# Altium footprint library ICs_VendorSpecific.PcbLib: 247 footprints (part 9 of 19)
Each footprint in its own frame and in the unit in brackets; x right, y up, seen from the top. Pads: shape width x height; smd on the part's side, far side on the other; paste and mask are expansions set on the pad; w line width, h text height; cw(c..) or ccw(c..) is an arc to the next point about the centre after c.
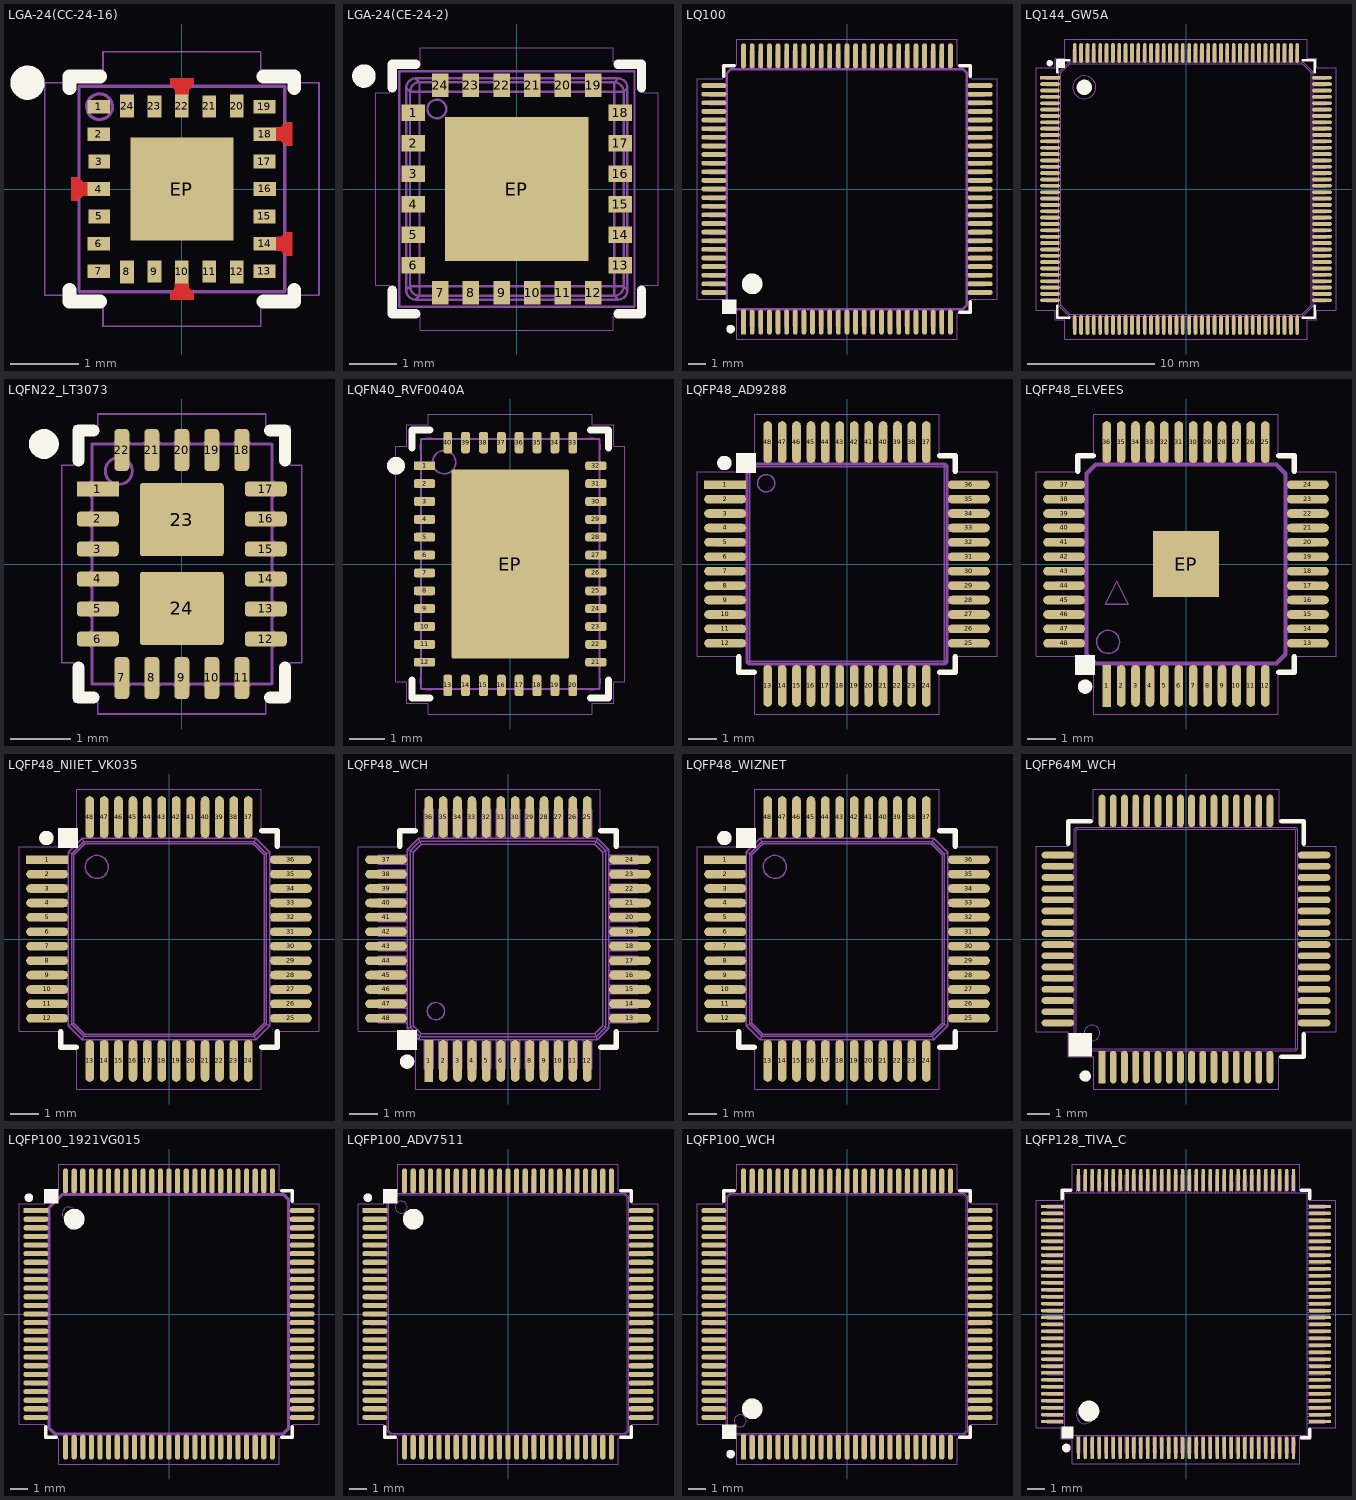
[diagram p8: the footprints below, top view; thin cyan lines are the x and y axes]

## LGA-24(CC-24-16) [mm] "LGA, 24-Leads, Body 3x3mm, Pitch 0.40mm, Thermal Pad 1.50x1.50mm"
height 0.696
pads (25):
  rect 0.33x0.2 smd mask+0.05: 1(-1.21,1.2) 2(-1.21,0.8) 4(-1.21,0) 6(-1.21,-0.8) 7(-1.21,-1.2) 14(1.21,-0.8) 16(1.21,0) 18(1.21,0.8)
  rect 0.32x0.2 smd mask+0.05: 3(-1.205,0.4) 5(-1.205,-0.4) 13(1.205,-1.2) 15(1.205,-0.4) 17(1.205,0.4) 19(1.205,1.2)
  rect 0.2x0.33 smd mask+0.05: 8(-0.8,-1.21) 10(0,-1.21) 12(0.8,-1.21) 20(0.8,1.21) 22(0,1.21) 24(-0.8,1.21)
  rect 0.2x0.32 smd mask+0.05: 9(-0.4,-1.205) 11(0.4,-1.205) 21(0.4,1.205) 23(-0.4,1.205)
  rect 1.5x1.5 smd paste-4 mask+0.1: EP(0,0)
Top Layer:
  region: -1.519,0.17 -1.439,0.1 -1.37,0.1 -1.37,-0.1 -1.439,-0.1 -1.519,-0.17 -1.613,-0.17 -1.613,0.17
  region: 0.17,1.519 0.1,1.439 0.1,1.37 -0.1,1.37 -0.1,1.439 -0.17,1.519 -0.17,1.613 0.17,1.613
  region: 1.519,0.63 1.439,0.7 1.37,0.7 1.37,0.9 1.439,0.9 1.519,0.97 1.613,0.97 1.613,0.63
  region: 1.519,-0.97 1.439,-0.9 1.37,-0.9 1.37,-0.7 1.439,-0.7 1.519,-0.63 1.613,-0.63 1.613,-0.97
  region: -0.17,-1.519 -0.1,-1.439 -0.1,-1.37 0.1,-1.37 0.1,-1.439 0.17,-1.519 0.17,-1.613 -0.17,-1.613
Top Overlay:
  circle w0.25: c-2.25,1.55 r0.125
  lines w0.2: -1.64,-1.474 -1.64,-1.64 -1.19,-1.64 ; -1.64,1.474 -1.64,1.64 -1.19,1.64 ; 1.19,-1.64 1.64,-1.64 1.64,-1.474 ; 1.19,1.64 1.64,1.64 1.64,1.474
Top Paste:
  rectangle: -0.7,0.1 -0.1,0.7
  rectangle: 0.1,0.1 0.7,0.7
  rectangle: -0.7,-0.7 -0.1,-0.1
  rectangle: 0.1,-0.7 0.7,-0.1
  region: -0.7,1.375 -0.9,1.375 -0.9,1.475 -0.7,1.475
  region: -0.3,1.365 -0.5,1.365 -0.5,1.465 -0.3,1.465
  region: 0.1,1.375 -0.1,1.375 -0.1,1.475 0.1,1.475
  region: 0.5,1.365 0.3,1.365 0.3,1.465 0.5,1.465
  region: 0.9,1.375 0.7,1.375 0.7,1.475 0.9,1.475
  region: 1.365,1.1 1.365,1.3 1.465,1.3 1.465,1.1
  region: 1.375,0.7 1.375,0.9 1.475,0.9 1.475,0.7
  region: 1.365,0.3 1.365,0.5 1.465,0.5 1.465,0.3
  region: 1.375,-0.1 1.375,0.1 1.475,0.1 1.475,-0.1
  region: 1.365,-0.5 1.365,-0.3 1.465,-0.3 1.465,-0.5
  region: 1.375,-0.9 1.375,-0.7 1.475,-0.7 1.475,-0.9
  region: 1.365,-1.3 1.365,-1.1 1.465,-1.1 1.465,-1.3
  region: 0.7,-1.375 0.9,-1.375 0.9,-1.475 0.7,-1.475
  region: 0.3,-1.365 0.5,-1.365 0.5,-1.465 0.3,-1.465
  region: -0.1,-1.375 0.1,-1.375 0.1,-1.475 -0.1,-1.475
  region: -0.5,-1.365 -0.3,-1.365 -0.3,-1.465 -0.5,-1.465
  region: -0.9,-1.375 -0.7,-1.375 -0.7,-1.475 -0.9,-1.475
  region: -1.375,-1.1 -1.375,-1.3 -1.475,-1.3 -1.475,-1.1
  region: -1.375,-0.7 -1.375,-0.9 -1.475,-0.9 -1.475,-0.7
  region: -1.365,-0.3 -1.365,-0.5 -1.465,-0.5 -1.465,-0.3
  region: -1.37,0.1 -1.37,-0.1 -1.47,-0.1 -1.47,0.1
  region: -1.365,0.5 -1.365,0.3 -1.465,0.3 -1.465,0.5
  region: -1.375,1.3 -1.375,1.1 -1.475,1.1 -1.475,1.3
  region: -1.375,0.9 -1.375,0.7 -1.475,0.7 -1.475,0.9
Top Solder:
  region: 1.415,-1.05 1.65,-1.05 1.65,-1.35 1.415,-1.35
  region: 1.415,1.35 1.65,1.35 1.65,1.05 1.415,1.05
  region: 0.65,1.415 0.65,1.65 0.95,1.65 0.95,1.415
  region: -0.95,1.415 -0.95,1.65 -0.65,1.65 -0.65,1.415
  region: 0.25,1.41 0.25,1.65 0.55,1.65 0.55,1.41
  region: -0.55,1.41 -0.55,1.65 -0.25,1.65 -0.25,1.41
  region: -0.15,1.424 -0.15,1.65 0.15,1.65 0.15,1.424
  region: 1.415,-0.65 1.65,-0.65 1.65,-0.95 1.415,-0.95
  region: 1.415,0.95 1.65,0.95 1.65,0.65 1.415,0.65
  region: 1.41,-0.25 1.65,-0.25 1.65,-0.55 1.41,-0.55
  region: 1.41,0.55 1.65,0.55 1.65,0.25 1.41,0.25
  region: 1.424,0.15 1.65,0.15 1.65,-0.15 1.424,-0.15
  region: -1.415,0.95 -1.65,0.95 -1.65,0.65 -1.415,0.65
  region: -1.41,-0.25 -1.65,-0.25 -1.65,-0.55 -1.41,-0.55
  region: -1.41,0.55 -1.65,0.55 -1.65,0.25 -1.41,0.25
  region: -1.424,0.15 -1.65,0.15 -1.65,-0.15 -1.424,-0.15
  region: 0.65,-1.415 0.65,-1.65 0.95,-1.65 0.95,-1.415
  region: 0.25,-1.41 0.25,-1.65 0.55,-1.65 0.55,-1.41
  region: -0.15,-1.424 -0.15,-1.65 0.15,-1.65 0.15,-1.424
  region: -1.415,1.35 -1.65,1.35 -1.65,1.05 -1.415,1.05
  region: -1.415,-0.65 -1.65,-0.65 -1.65,-0.95 -1.415,-0.95
  region: -1.415,-1.05 -1.65,-1.05 -1.65,-1.35 -1.415,-1.35
  region: -0.95,-1.415 -0.95,-1.65 -0.65,-1.65 -0.65,-1.415
  region: -0.55,-1.41 -0.55,-1.65 -0.25,-1.65 -0.25,-1.41
Top Courtyard:
  lines w0.025: -2,-1.55 -1.7,-1.55 -1.7,-1.7 -1.15,-1.7 -1.15,-2 1.15,-2 1.15,-1.7 1.7,-1.7 1.7,-1.55 2,-1.55 2,1.55 1.7,1.55 1.7,1.7 1.15,1.7 1.15,2 -1.15,2 -1.15,1.7 -1.7,1.7 -1.7,1.55 -2,1.55 -2,-1.55
Top Assembly:
  lines w0.05: -1.014,1.221 ccw(c-1.2,1.2) -1.013,1.19 ; -1.5,-1.5 -1.5,1.5 1.5,1.5 1.5,-1.5 -1.5,-1.5
  text ".Designator" at -4.511,-0.453 h2
3D body "CC-24-16(LGA24).x_t": height 0.7, standoff -0.01, extent -1.5,-1.5 1.5,1.5

## LGA-24(CE-24-2) [mm] "24-Terminal Chip Array Small Outline No Lead [LGA_CAV]  5.00 mm x 5.00 mm Body and 1.60 mm Height"
height 1.6
pads (25):
  rect 0.5x0.35 smd mask+0.05: 1(-2.2,1.625) 2(-2.2,0.975) 3(-2.2,0.325) 4(-2.2,-0.325) 5(-2.2,-0.975) 6(-2.2,-1.625) 13(2.2,-1.625) 14(2.2,-0.975) 15(2.2,-0.325) 16(2.2,0.325) 17(2.2,0.975) 18(2.2,1.625)
  rect 0.35x0.5 smd mask+0.05: 7(-1.625,-2.2) 8(-0.975,-2.2) 9(-0.325,-2.2) 10(0.325,-2.2) 11(0.975,-2.2) 12(1.625,-2.2) 19(1.625,2.2) 20(0.975,2.2) 21(0.325,2.2) 22(-0.325,2.2) 23(-0.975,2.2) 24(-1.625,2.2)
  rect 3.05x3.05 smd paste-5 mask+0.01: EP(0,0)
Top Overlay:
  circle w0.25: c-3.25,2.4 r0.125
  lines w0.2: -2.65,-2.15 -2.65,-2.65 -2.15,-2.65 ; -2.65,2.15 -2.65,2.65 -2.15,2.65 ; 2.15,-2.65 2.65,-2.65 2.65,-2.15 ; 2.15,2.65 2.65,2.65 2.65,2.15
Top Paste:
  rectangle: 0.1,0.9 0.7,1.5
  rectangle: -0.7,0.9 -0.1,1.5
  rectangle: 0.1,-0.7 0.7,-0.1
  rectangle: -0.7,-0.7 -0.1,-0.1
  rectangle: 0.1,0.1 0.7,0.7
  rectangle: -0.7,0.1 -0.1,0.7
  region: -0.9,1.5 -1.5,1.5 -1.5,0.9 -0.9,0.9
  region: -0.9,-0.1 -1.5,-0.1 -1.5,-0.7 -0.9,-0.7
  region: -0.9,0.7 -1.5,0.7 -1.5,0.1 -0.9,0.1
  rectangle: 0.9,0.9 1.5,1.5
  rectangle: 0.9,-0.7 1.5,-0.1
  rectangle: 0.9,0.1 1.5,0.7
  rectangle: 0.1,-1.5 0.7,-0.9
  rectangle: -0.7,-1.5 -0.1,-0.9
  region: -0.9,-0.9 -1.5,-0.9 -1.5,-1.5 -0.9,-1.5
  rectangle: 0.9,-1.5 1.5,-0.9
Top Solder:
  region: -2.45,-1.4 -2.8,-1.4 -2.8,-1.85 -2.45,-1.85
  region: -2.45,-0.75 -2.8,-0.75 -2.8,-1.2 -2.45,-1.2
  region: -2.45,-0.1 -2.8,-0.1 -2.8,-0.55 -2.45,-0.55
  region: -2.45,0.55 -2.8,0.55 -2.8,0.1 -2.45,0.1
  region: -2.45,1.2 -2.8,1.2 -2.8,0.75 -2.45,0.75
  region: -2.45,1.85 -2.8,1.85 -2.8,1.4 -2.45,1.4
  region: -1.4,2.45 -1.4,2.8 -1.85,2.8 -1.85,2.45
  region: -0.75,2.45 -0.75,2.8 -1.2,2.8 -1.2,2.45
  region: -0.1,2.45 -0.1,2.8 -0.55,2.8 -0.55,2.45
  region: 0.55,2.45 0.55,2.8 0.1,2.8 0.1,2.45
  region: 1.2,2.45 1.2,2.8 0.75,2.8 0.75,2.45
  region: 1.85,2.45 1.85,2.8 1.4,2.8 1.4,2.45
  region: 2.45,1.4 2.8,1.4 2.8,1.85 2.45,1.85
  region: 2.45,0.75 2.8,0.75 2.8,1.2 2.45,1.2
  region: 2.45,0.1 2.8,0.1 2.8,0.55 2.45,0.55
  region: 2.45,-0.55 2.8,-0.55 2.8,-0.1 2.45,-0.1
  region: 2.45,-1.2 2.8,-1.2 2.8,-0.75 2.45,-0.75
  region: 2.45,-1.85 2.8,-1.85 2.8,-1.4 2.45,-1.4
  region: 1.4,-2.45 1.4,-2.8 1.85,-2.8 1.85,-2.45
  region: 0.75,-2.45 0.75,-2.8 1.2,-2.8 1.2,-2.45
  region: 0.1,-2.45 0.1,-2.8 0.55,-2.8 0.55,-2.45
  region: -0.55,-2.45 -0.55,-2.8 -0.1,-2.8 -0.1,-2.45
  region: -1.2,-2.45 -1.2,-2.8 -0.75,-2.8 -0.75,-2.45
  region: -1.85,-2.45 -1.85,-2.8 -1.4,-2.8 -1.4,-2.45
Top Courtyard:
  lines w0.025: -3,-2.05 -2.7,-2.05 -2.7,-2.7 -2.05,-2.7 -2.05,-3 2.05,-3 2.05,-2.7 2.7,-2.7 2.7,-2.05 3,-2.05 3,2.05 2.7,2.05 2.7,2.7 2.05,2.7 2.05,3 -2.05,3 -2.05,2.7 -2.7,2.7 -2.7,2.05 -3,2.05 -3,-2.05
Top Assembly:
  circle w0.05: c-1.7,1.7 r0.2
  lines w0.05: -2.35,-2.15 ccw(c-2.151,-2.151) -2.15,-2.35 ; -2.35,-2.15 -2.35,2.15 ; -2.35,-2.15 -2.269,-2.069 ; -2.35,2.15 cw(c-2.151,2.151) -2.15,2.35 ; -2.35,2.15 -2.269,2.069 ; -2.269,-2.069 ccw(c-2.068,-2.068) -2.069,-2.269 ; -2.269,-2.069 -2.269,2.069 ; -2.269,-2.069 2.269,-2.069 ; -2.269,2.069 cw(c-2.068,2.068) -2.069,2.269 ; -2.269,2.069 2.269,2.069 ; -2.15,-2.35 2.15,-2.35 ; -2.15,-2.35 -2.069,-2.269 ; -2.15,2.35 2.15,2.35 ; -2.15,2.35 -2.069,2.269 ; -2.069,-2.269 2.069,-2.269 ; -2.069,-2.269 -2.069,2.269 ; -2.069,2.269 2.069,2.269 ; 2.069,-2.269 ccw(c2.068,-2.068) 2.269,-2.069 ; 2.069,-2.269 2.15,-2.35 ; 2.069,-2.269 2.069,2.269 ; 2.069,2.269 cw(c2.068,2.068) 2.269,2.069 ; 2.069,2.269 2.15,2.35 ; 2.15,-2.35 ccw(c2.151,-2.151) 2.35,-2.15 ; 2.15,2.35 cw(c2.151,2.151) 2.35,2.15 ; 2.269,-2.069 2.35,-2.15 ; 2.269,-2.069 2.269,2.069 ; 2.269,2.069 2.35,2.15 ; 2.35,-2.15 2.35,2.15 ; -2.5,-2.5 -2.5,2.5 2.5,2.5 2.5,-2.5 -2.5,-2.5
  text ".Designator" at -4.511,-0.453 h2
3D body "CE-24-2.x_t": height 1.6, standoff -0.01, extent -2.5,-2.5 2.5,2.5

## LQ100 [mm] "LQFP, 100-Leads, Body 14.00x14.00mm, Pitch 0.50mm, IPC Medium Density"
height 1.6
pads (100):
  rect 0.275x1.45 smd paste+0 mask+0.05: 1(-6,-7.725)
  oval 0.275x1.45 smd paste+0 mask+0.05: 2(-5.5,-7.725) 3(-5,-7.725) 4(-4.5,-7.725) 5(-4,-7.725) 6(-3.5,-7.725) 7(-3,-7.725) 8(-2.5,-7.725) 9(-2,-7.725) 10(-1.5,-7.725) 11(-1,-7.725) 12(-0.5,-7.725) 13(0,-7.725) 14(0.5,-7.725) 15(1,-7.725) 16(1.5,-7.725) 17(2,-7.725) 18(2.5,-7.725) 19(3,-7.725) 20(3.5,-7.725) 21(4,-7.725) 22(4.5,-7.725) 23(5,-7.725) 24(5.5,-7.725) 25(6,-7.725) 51(6,7.725) 52(5.5,7.725) 53(5,7.725) 54(4.5,7.725) 55(4,7.725) 56(3.5,7.725) 57(3,7.725) 58(2.5,7.725) 59(2,7.725) 60(1.5,7.725) 61(1,7.725) 62(0.5,7.725) 63(0,7.725) 64(-0.5,7.725) 65(-1,7.725) 66(-1.5,7.725) 67(-2,7.725) 68(-2.5,7.725) 69(-3,7.725) 70(-3.5,7.725) 71(-4,7.725) 72(-4.5,7.725) 73(-5,7.725) 74(-5.5,7.725) 75(-6,7.725)
  oval 1.45x0.275 smd paste+0 mask+0.05: 26(7.725,-6) 27(7.725,-5.5) 28(7.725,-5) 29(7.725,-4.5) 30(7.725,-4) 31(7.725,-3.5) 32(7.725,-3) 33(7.725,-2.5) 34(7.725,-2) 35(7.725,-1.5) 36(7.725,-1) 37(7.725,-0.5) 38(7.725,0) 39(7.725,0.5) 40(7.725,1) 41(7.725,1.5) 42(7.725,2) 43(7.725,2.5) 44(7.725,3) 45(7.725,3.5) 46(7.725,4) 47(7.725,4.5) 48(7.725,5) 49(7.725,5.5) 50(7.725,6) 76(-7.725,6) 77(-7.725,5.5) 78(-7.725,5) 79(-7.725,4.5) 80(-7.725,4) 81(-7.725,3.5) 82(-7.725,3) 83(-7.725,2.5) 84(-7.725,2) 85(-7.725,1.5) 86(-7.725,1) 87(-7.725,0.5) 88(-7.725,0) 89(-7.725,-0.5) 90(-7.725,-1) 91(-7.725,-1.5) 92(-7.725,-2) 93(-7.725,-2.5) 94(-7.725,-3) 95(-7.725,-3.5) 96(-7.725,-4) 97(-7.725,-4.5) 98(-7.725,-5) 99(-7.725,-5.5) 100(-7.725,-6)
Top Overlay:
  circle w0.6: c-5.5,-5.5 r0.3
  circle w0.25: c-6.75,-8.125 r0.125
  region: -6.4,-7.25 -6.4,-6.4 -7.25,-6.4 -7.25,-7.25
  lines w0.2: -7.15,6.525 -7.15,7.15 -6.55,7.15 ; 6.525,7.15 7.15,7.15 7.15,6.55 ; 6.55,-7.15 7.15,-7.15 7.15,-6.525
Top Courtyard:
  lines w0.025: -8.7,-6.4 -8.7,6.4 -7.2,6.4 -7.2,7.2 -6.4,7.2 -6.4,8.7 6.4,8.7 6.4,7.2 7.2,7.2 7.2,6.4 8.7,6.4 8.7,-6.4 7.2,-6.4 7.2,-7.2 6.4,-7.2 6.4,-8.7 -6.4,-8.7 -6.4,-7.2 -7.2,-7.2 -7.2,-6.4 -8.7,-6.4
Top Assembly:
  drawing of 1741 lines, arcs and shapes, not listed
  text ".Designator" at -4.511,-0.453 h2
3D body "LQ100_LQ100X.x_t": height 1.45, standoff 0, extent -8,-8 8,8

## LQ144_GW5A [mm] "LQFP-144, 144-Leads, Body 20.00x20.00mm, Pitch 0.50mm"
height 1.4
pads (144):
  rect 1.55x0.3 smd paste+0 mask+0.05: 1(-10.7,8.75)
  oval 1.55x0.3 smd paste+0 mask+0.05: 2(-10.7,8.25) 3(-10.7,7.75) 4(-10.7,7.25) 5(-10.7,6.75) 6(-10.7,6.25) 7(-10.7,5.75) 8(-10.7,5.25) 9(-10.7,4.75) 10(-10.7,4.25) 11(-10.7,3.75) 12(-10.7,3.25) 13(-10.7,2.75) 14(-10.7,2.25) 15(-10.7,1.75) 16(-10.7,1.25) 17(-10.7,0.75) 18(-10.7,0.25) 19(-10.7,-0.25) 20(-10.7,-0.75) 21(-10.7,-1.25) 22(-10.7,-1.75) 23(-10.7,-2.25) 24(-10.7,-2.75) 25(-10.7,-3.25) 26(-10.7,-3.75) 27(-10.7,-4.25) 28(-10.7,-4.75) 29(-10.7,-5.25) 30(-10.7,-5.75) 31(-10.7,-6.25) 32(-10.7,-6.75) 33(-10.7,-7.25) 34(-10.7,-7.75) 35(-10.7,-8.25) 36(-10.7,-8.75) 73(10.7,-8.75) 74(10.7,-8.25) 75(10.7,-7.75) 76(10.7,-7.25) 77(10.7,-6.75) 78(10.7,-6.25) 79(10.7,-5.75) 80(10.7,-5.25) 81(10.7,-4.75) 82(10.7,-4.25) 83(10.7,-3.75) 84(10.7,-3.25) 85(10.7,-2.75) 86(10.7,-2.25) 87(10.7,-1.75) 88(10.7,-1.25) 89(10.7,-0.75) 90(10.7,-0.25) 91(10.7,0.25) 92(10.7,0.75) 93(10.7,1.25) 94(10.7,1.75) 95(10.7,2.25) 96(10.7,2.75) 97(10.7,3.25) 98(10.7,3.75) 99(10.7,4.25) 100(10.7,4.75) 101(10.7,5.25) 102(10.7,5.75) 103(10.7,6.25) 104(10.7,6.75) 105(10.7,7.25) 106(10.7,7.75) 107(10.7,8.25) 108(10.7,8.75)
  oval 0.3x1.55 smd paste+0 mask+0.05: 37(-8.75,-10.7) 38(-8.25,-10.7) 39(-7.75,-10.7) 40(-7.25,-10.7) 41(-6.75,-10.7) 42(-6.25,-10.7) 43(-5.75,-10.7) 44(-5.25,-10.7) 45(-4.75,-10.7) 46(-4.25,-10.7) 47(-3.75,-10.7) 48(-3.25,-10.7) 49(-2.75,-10.7) 50(-2.25,-10.7) 51(-1.75,-10.7) 52(-1.25,-10.7) 53(-0.75,-10.7) 54(-0.25,-10.7) 55(0.25,-10.7) 56(0.75,-10.7) 57(1.25,-10.7) 58(1.75,-10.7) 59(2.25,-10.7) 60(2.75,-10.7) 61(3.25,-10.7) 62(3.75,-10.7) 63(4.25,-10.7) 64(4.75,-10.7) 65(5.25,-10.7) 66(5.75,-10.7) 67(6.25,-10.7) 68(6.75,-10.7) 69(7.25,-10.7) 70(7.75,-10.7) 71(8.25,-10.7) 72(8.75,-10.7) 109(8.75,10.7) 110(8.25,10.7) 111(7.75,10.7) 112(7.25,10.7) 113(6.75,10.7) 114(6.25,10.7) 115(5.75,10.7) 116(5.25,10.7) 117(4.75,10.7) 118(4.25,10.7) 119(3.75,10.7) 120(3.25,10.7) 121(2.75,10.7) 122(2.25,10.7) 123(1.75,10.7) 124(1.25,10.7) 125(0.75,10.7) 126(0.25,10.7) 127(-0.25,10.7) 128(-0.75,10.7) 129(-1.25,10.7) 130(-1.75,10.7) 131(-2.25,10.7) 132(-2.75,10.7) 133(-3.25,10.7) 134(-3.75,10.7) 135(-4.25,10.7) 136(-4.75,10.7) 137(-5.25,10.7) 138(-5.75,10.7) 139(-6.25,10.7) 140(-6.75,10.7) 141(-7.25,10.7) 142(-7.75,10.7) 143(-8.25,10.7) 144(-8.75,10.7)
Top Overlay:
  circle w0.25: c-10.725,9.9 r0.125
  circle w0.6: c-8,8 r0.3
  rectangle: -10.175,9.5 -9.5,10.175
  lines w0.2: -10.125,-9.2 -10.125,-10.125 -9.2,-10.125 ; -10.125,9.2 -10.125,10.125 -9.2,10.125 ; -10.075,9.6 -10.075,10.075 -9.6,10.075 ; 9.2,-10.125 10.125,-10.125 10.125,-9.2 ; 9.2,10.125 10.125,10.125 10.125,9.2
Top Courtyard:
  lines w0.025: -11.8,-9.55 -11.8,9.55 -10.3,9.55 -10.3,10.3 -9.55,10.3 -9.55,11.8 9.55,11.8 9.55,10.3 10.3,10.3 10.3,9.55 11.8,9.55 11.8,-9.55 10.3,-9.55 10.3,-10.3 9.55,-10.3 9.55,-11.8 -9.55,-11.8 -9.55,-10.3 -10.3,-10.3 -10.3,-9.55 -11.8,-9.55
Top Assembly:
  drawing of 1033 lines, arcs and shapes, not listed
  text ".Designator" at -6.763,-0.679 h3
3D body "LQ144_GW5A.x_t": height 1.5, standoff 0, extent -11,-11 11,11

## LQFN22_LT3073 [mm] "LQFN22 3mm x 4mm, LTC DWG# 05-08-7054"
height 1.05
pads (24):
  rect 0.7x0.25 smd paste-0.025 mask+0.05: 1(-1.4,1.25)
  rrect50% 0.7x0.25 smd paste-0.025 mask+0.05: 2(-1.4,0.75) 3(-1.4,0.25) 4(-1.4,-0.25) 5(-1.4,-0.75) 6(-1.4,-1.25) 12(1.4,-1.25) 13(1.4,-0.75) 14(1.4,-0.25) 15(1.4,0.25) 16(1.4,0.75) 17(1.4,1.25)
  rrect50% 0.25x0.7 smd paste-0.025 mask+0.05: 7(-1,-1.9) 8(-0.5,-1.9) 9(0,-1.9) 10(0.5,-1.9) 11(1,-1.9) 18(1,1.9) 19(0.5,1.9) 20(0,1.9) 21(-0.5,1.9) 22(-1,1.9)
  rrect8% 1.4x1.22 smd paste-0.025 mask+0.05: 23(0,0.74) 24(0,-0.74)
Top Overlay:
  circle w0.25: c-2.3,2 r0.125
  lines w0.2: -1.725,-1.725 -1.725,-2.225 -1.475,-2.225 ; -1.725,1.725 -1.725,2.225 -1.475,2.225 ; 1.475,-2.225 1.725,-2.225 1.725,-1.725 ; 1.475,2.225 1.725,2.225 1.725,1.725
Top Courtyard:
  lines w0.025: -2,-1.65 -2,1.65 -1.8,1.65 -1.8,2.3 -1.4,2.3 -1.4,2.5 1.4,2.5 1.4,2.3 1.8,2.3 1.8,1.65 2,1.65 2,-1.65 1.8,-1.65 1.8,-2.3 1.4,-2.3 1.4,-2.5 -1.4,-2.5 -1.4,-2.3 -1.8,-2.3 -1.8,-1.65 -2,-1.65
Top Assembly:
  circle w0.05: c-1.05,1.55 r0.225
  lines w0.05: -1.5,-1.375 -1.525,-1.375 -1.525,-1.125 -1.5,-1.125 ; -1.5,-0.875 -1.525,-0.875 -1.525,-0.625 -1.5,-0.625 ; -1.5,-0.375 -1.525,-0.375 -1.525,-0.125 -1.5,-0.125 ; -1.5,0.125 -1.525,0.125 -1.525,0.375 -1.5,0.375 ; -1.5,0.625 -1.525,0.625 -1.525,0.875 -1.5,0.875 ; -1.5,1.125 -1.525,1.125 -1.525,1.375 -1.5,1.375 ; -1.125,-2 -1.125,-2.025 -0.875,-2.025 -0.875,-2 ; -1.125,2 -1.125,2.025 -0.875,2.025 -0.875,2 ; -0.625,-2 -0.625,-2.025 -0.375,-2.025 -0.375,-2 ; -0.625,2 -0.625,2.025 -0.375,2.025 -0.375,2 ; -0.125,-2 -0.125,-2.025 0.125,-2.025 0.125,-2 ; -0.125,2 -0.125,2.025 0.125,2.025 0.125,2 ; 0.375,-2 0.375,-2.025 0.625,-2.025 0.625,-2 ; 0.375,2 0.375,2.025 0.625,2.025 0.625,2 ; 0.875,-2 0.875,-2.025 1.125,-2.025 1.125,-2 ; 0.875,2 0.875,2.025 1.125,2.025 1.125,2 ; 1.5,-1.375 1.525,-1.375 1.525,-1.125 1.5,-1.125 ; 1.5,-0.875 1.525,-0.875 1.525,-0.625 1.5,-0.625 ; 1.5,-0.375 1.525,-0.375 1.525,-0.125 1.5,-0.125 ; 1.5,0.125 1.525,0.125 1.525,0.375 1.5,0.375 ; 1.5,0.625 1.525,0.625 1.525,0.875 1.5,0.875 ; 1.5,1.125 1.525,1.125 1.525,1.375 1.5,1.375 ; -1.5,-2 1.5,-2 1.5,2 -1.5,2 -1.5,-2
  text ".Designator" at -2.252,-0.226 h1
3D body "LQFN22_LT3073.x_t": height 1.1, standoff 0, extent -1.525,-2.025 1.525,2.025

## LQFN40_RVF0040A [mm] "LQFN-CLIP 5mm x 7mm, TI case RVF0040A"
height 1.52
pads (41):
  rect 0.6x0.25 smd paste+0 mask+0.05: 1(-2.4,2.75)
  rrect50% 0.6x0.25 smd paste+0 mask+0.05: 2(-2.4,2.25) 3(-2.4,1.75) 4(-2.4,1.25) 5(-2.4,0.75) 6(-2.4,0.25) 7(-2.4,-0.25) 8(-2.4,-0.75) 9(-2.4,-1.25) 10(-2.4,-1.75) 11(-2.4,-2.25) 12(-2.4,-2.75) 21(2.4,-2.75) 22(2.4,-2.25) 23(2.4,-1.75) 24(2.4,-1.25) 25(2.4,-0.75) 26(2.4,-0.25) 27(2.4,0.25) 28(2.4,0.75) 29(2.4,1.25) 30(2.4,1.75) 31(2.4,2.25) 32(2.4,2.75)
  rrect50% 0.25x0.6 smd paste+0 mask+0.05: 13(-1.75,-3.4) 14(-1.25,-3.4) 15(-0.75,-3.4) 16(-0.25,-3.4) 17(0.25,-3.4) 18(0.75,-3.4) 19(1.25,-3.4) 20(1.75,-3.4) 33(1.75,3.4) 34(1.25,3.4) 35(0.75,3.4) 36(0.25,3.4) 37(-0.25,3.4) 38(-0.75,3.4) 39(-1.25,3.4) 40(-1.75,3.4)
  rrect4% 3.3x5.3 smd paste-10 mask+0.05: EP(0,0)
Top Overlay:
  circle w0.25: c-3.2,2.75 r0.125
  lines w0.2: -2.75,-3.25 -2.75,-3.75 -2.25,-3.75 ; -2.75,3.25 -2.75,3.75 -2.25,3.75 ; 2.25,-3.75 2.75,-3.75 2.75,-3.25 ; 2.25,3.75 2.75,3.75 2.75,3.25
Top Paste:
  rectangle: -1.58,-2.61 -0.15,-1.53
  rectangle: 0.15,-2.61 1.58,-1.53
  rectangle: -1.58,1.53 -0.15,2.61
  rectangle: -1.58,0.15 -0.15,1.23
  rectangle: -1.58,-1.23 -0.15,-0.15
  rectangle: 0.15,1.53 1.58,2.61
  rectangle: 0.15,0.15 1.58,1.23
  rectangle: 0.15,-1.23 1.58,-0.15
Top Courtyard:
  lines w0.025: -3.2,-3.3 -2.9,-3.3 -2.9,-3.9 -2.3,-3.9 -2.3,-4.2 2.3,-4.2 2.3,-3.9 2.9,-3.9 2.9,-3.3 3.2,-3.3 3.2,3.3 2.9,3.3 2.9,3.9 2.3,3.9 2.3,4.2 -2.3,4.2 -2.3,3.9 -2.9,3.9 -2.9,3.3 -3.2,3.3 -3.2,-3.3
Top Assembly:
  circle w0.05: c-1.85,2.85 r0.325
  lines w0.05: -2.5,-3.35 -2.52,-3.35 -2.52,-3.2 -2.5,-3.2 ; -2.5,-2.875 -2.52,-2.875 -2.52,-2.625 -2.5,-2.625 ; -2.5,-2.375 -2.52,-2.375 -2.52,-2.125 -2.5,-2.125 ; -2.5,-1.875 -2.52,-1.875 -2.52,-1.625 -2.5,-1.625 ; -2.5,-1.375 -2.52,-1.375 -2.52,-1.125 -2.5,-1.125 ; -2.5,-0.875 -2.52,-0.875 -2.52,-0.625 -2.5,-0.625 ; -2.5,-0.375 -2.52,-0.375 -2.52,-0.125 -2.5,-0.125 ; -2.5,0.125 -2.52,0.125 -2.52,0.375 -2.5,0.375 ; -2.5,0.625 -2.52,0.625 -2.52,0.875 -2.5,0.875 ; -2.5,1.125 -2.52,1.125 -2.52,1.375 -2.5,1.375 ; -2.5,1.625 -2.52,1.625 -2.52,1.875 -2.5,1.875 ; -2.5,2.125 -2.52,2.125 -2.52,2.375 -2.5,2.375 ; -2.5,2.625 -2.52,2.625 -2.52,2.875 -2.5,2.875 ; -2.5,3.2 -2.52,3.2 -2.52,3.35 -2.5,3.35 ; -2.35,-3.5 -2.35,-3.52 -2.2,-3.52 -2.2,-3.5 ; -2.35,3.5 -2.35,3.52 -2.2,3.52 -2.2,3.5 ; -1.875,-3.5 -1.875,-3.52 -1.625,-3.52 -1.625,-3.5 ; -1.875,3.5 -1.875,3.52 -1.625,3.52 -1.625,3.5 ; -1.375,-3.5 -1.375,-3.52 -1.125,-3.52 -1.125,-3.5 ; -1.375,3.5 -1.375,3.52 -1.125,3.52 -1.125,3.5 ; -0.875,-3.5 -0.875,-3.52 -0.625,-3.52 -0.625,-3.5 ; -0.875,3.5 -0.875,3.52 -0.625,3.52 -0.625,3.5 ; -0.375,-3.5 -0.375,-3.52 -0.125,-3.52 -0.125,-3.5 ; -0.375,3.5 -0.375,3.52 -0.125,3.52 -0.125,3.5 ; 0.125,-3.5 0.125,-3.52 0.375,-3.52 0.375,-3.5 ; 0.125,3.5 0.125,3.52 0.375,3.52 0.375,3.5 ; 0.625,-3.5 0.625,-3.52 0.875,-3.52 0.875,-3.5 ; 0.625,3.5 0.625,3.52 0.875,3.52 0.875,3.5 ; 1.125,-3.5 1.125,-3.52 1.375,-3.52 1.375,-3.5 ; 1.125,3.5 1.125,3.52 1.375,3.52 1.375,3.5 ; 1.625,-3.5 1.625,-3.52 1.875,-3.52 1.875,-3.5 ; 1.625,3.5 1.625,3.52 1.875,3.52 1.875,3.5 ; 2.2,-3.5 2.2,-3.52 2.35,-3.52 2.35,-3.5 ; 2.2,3.5 2.2,3.52 2.35,3.52 2.35,3.5 ; 2.5,-3.35 2.52,-3.35 2.52,-3.2 2.5,-3.2 ; 2.5,-2.875 2.52,-2.875 2.52,-2.625 2.5,-2.625 ; 2.5,-2.375 2.52,-2.375 2.52,-2.125 2.5,-2.125 ; 2.5,-1.875 2.52,-1.875 2.52,-1.625 2.5,-1.625 ; 2.5,-1.375 2.52,-1.375 2.52,-1.125 2.5,-1.125 ; 2.5,-0.875 2.52,-0.875 2.52,-0.625 2.5,-0.625 ; 2.5,-0.375 2.52,-0.375 2.52,-0.125 2.5,-0.125 ; 2.5,0.125 2.52,0.125 2.52,0.375 2.5,0.375 ; 2.5,0.625 2.52,0.625 2.52,0.875 2.5,0.875 ; 2.5,1.125 2.52,1.125 2.52,1.375 2.5,1.375 ; 2.5,1.625 2.52,1.625 2.52,1.875 2.5,1.875 ; 2.5,2.125 2.52,2.125 2.52,2.375 2.5,2.375 ; 2.5,2.625 2.52,2.625 2.52,2.875 2.5,2.875 ; 2.5,3.2 2.52,3.2 2.52,3.35 2.5,3.35 ; -2.5,-3.5 2.5,-3.5 2.5,3.5 -2.5,3.5 -2.5,-3.5
  text ".Designator" at -4.511,-0.453 h2
3D body "LQFN-CLIP(RVF0040A).x_t": height 1.45, standoff 0.01, extent -2.52,-3.52 2.52,3.52

## LQFP48_AD9288 [mm] "Analog Devices case style ST48, compatible JEDEC MS-026BBC, 48-Leads, Body 7,00x7,00mm, Pitch 0,50mm"
height 1.6
pads (48):
  rect 1.45x0.3 smd paste+0 mask+0.05: 1(-4.225,2.75)
  oval 1.45x0.3 smd paste+0 mask+0.05: 2(-4.225,2.25) 3(-4.225,1.75) 4(-4.225,1.25) 5(-4.225,0.75) 6(-4.225,0.25) 7(-4.225,-0.25) 8(-4.225,-0.75) 9(-4.225,-1.25) 10(-4.225,-1.75) 11(-4.225,-2.25) 12(-4.225,-2.75) 25(4.225,-2.75) 26(4.225,-2.25) 27(4.225,-1.75) 28(4.225,-1.25) 29(4.225,-0.75) 30(4.225,-0.25) 31(4.225,0.25) 32(4.225,0.75) 33(4.225,1.25) 34(4.225,1.75) 35(4.225,2.25) 36(4.225,2.75)
  oval 0.3x1.45 smd paste+0 mask+0.05: 13(-2.75,-4.225) 14(-2.25,-4.225) 15(-1.75,-4.225) 16(-1.25,-4.225) 17(-0.75,-4.225) 18(-0.25,-4.225) 19(0.25,-4.225) 20(0.75,-4.225) 21(1.25,-4.225) 22(1.75,-4.225) 23(2.25,-4.225) 24(2.75,-4.225) 37(2.75,4.225) 38(2.25,4.225) 39(1.75,4.225) 40(1.25,4.225) 41(0.75,4.225) 42(0.25,4.225) 43(-0.25,4.225) 44(-0.75,4.225) 45(-1.25,4.225) 46(-1.75,4.225) 47(-2.25,4.225) 48(-2.75,4.225)
Top Overlay:
  circle w0.25: c-4.25,3.5 r0.125
  rectangle: -3.85,3.15 -3.15,3.85
  lines w0.2: -3.75,-3.225 -3.75,-3.75 -3.225,-3.75 ; 3.225,-3.75 3.75,-3.75 3.75,-3.225 ; 3.225,3.75 3.75,3.75 3.75,3.225
Top Courtyard:
  lines w0.025: -5.2,-3.2 -3.75,-3.2 -3.75,-3.75 -3.2,-3.75 -3.2,-5.2 3.2,-5.2 3.2,-3.75 3.75,-3.75 3.75,-3.2 5.2,-3.2 5.2,3.2 3.75,3.2 3.75,3.75 3.2,3.75 3.2,5.2 -3.2,5.2 -3.2,3.75 -3.75,3.75 -3.75,3.2 -5.2,3.2 -5.2,-3.2
Top Assembly:
  drawing of 369 lines, arcs and shapes, not listed
  text ".Designator" at -4.511,-0.453 h2
3D body "LQFP48_AD9288.x_t": height 1.6, standoff 0, extent -4.501,-4.5 4.499,4.5

## LQFP48_ELVEES [mm] "LQFP, 48-Leads, Body 7,00x7,00mm, Pitch 0,50mm"
height 1.6
pads (49):
  rect 0.3x1.45 smd paste+0 mask+0.05: 1(-2.75,-4.225)
  oval 0.3x1.45 smd paste+0 mask+0.05: 2(-2.25,-4.225) 3(-1.75,-4.225) 4(-1.25,-4.225) 5(-0.75,-4.225) 6(-0.25,-4.225) 7(0.25,-4.225) 8(0.75,-4.225) 9(1.25,-4.225) 10(1.75,-4.225) 11(2.25,-4.225) 12(2.75,-4.225) 25(2.75,4.225) 26(2.25,4.225) 27(1.75,4.225) 28(1.25,4.225) 29(0.75,4.225) 30(0.25,4.225) 31(-0.25,4.225) 32(-0.75,4.225) 33(-1.25,4.225) 34(-1.75,4.225) 35(-2.25,4.225) 36(-2.75,4.225)
  oval 1.45x0.3 smd paste+0 mask+0.05: 13(4.225,-2.75) 14(4.225,-2.25) 15(4.225,-1.75) 16(4.225,-1.25) 17(4.225,-0.75) 18(4.225,-0.25) 19(4.225,0.25) 20(4.225,0.75) 21(4.225,1.25) 22(4.225,1.75) 23(4.225,2.25) 24(4.225,2.75) 37(-4.225,2.75) 38(-4.225,2.25) 39(-4.225,1.75) 40(-4.225,1.25) 41(-4.225,0.75) 42(-4.225,0.25) 43(-4.225,-0.25) 44(-4.225,-0.75) 45(-4.225,-1.25) 46(-4.225,-1.75) 47(-4.225,-2.25) 48(-4.225,-2.75)
  rect 2.3x2.3 smd paste-2 mask+0.05: EP(0,0)
Top Overlay:
  circle w0.25: c-3.5,-4.25 r0.125
  region: -3.15,-3.85 -3.15,-3.15 -3.85,-3.15 -3.85,-3.85
  lines w0.2: -3.75,3.225 -3.75,3.75 -3.225,3.75 ; 3.225,-3.75 3.75,-3.75 3.75,-3.225 ; 3.225,3.75 3.75,3.75 3.75,3.225
Top Paste:
  rectangle: -1.05,0.55 -0.55,1.05
  rectangle: -0.25,0.55 0.25,1.05
  rectangle: 0.55,0.55 1.05,1.05
  rectangle: -1.05,-0.25 -0.55,0.25
  rectangle: -1.05,-1.05 -0.55,-0.55
  rectangle: -0.25,-0.25 0.25,0.25
  rectangle: 0.55,-0.25 1.05,0.25
  rectangle: -0.25,-1.05 0.25,-0.55
  rectangle: 0.55,-1.05 1.05,-0.55
Top Courtyard:
  lines w0.025: -5.2,-3.2 -3.75,-3.2 -3.75,-3.75 -3.2,-3.75 -3.2,-5.2 3.2,-5.2 3.2,-3.75 3.75,-3.75 3.75,-3.2 5.2,-3.2 5.2,3.2 3.75,3.2 3.75,3.75 3.2,3.75 3.2,5.2 -3.2,5.2 -3.2,3.75 -3.75,3.75 -3.75,3.2 -5.2,3.2 -5.2,-3.2
Top Assembly:
  drawing of 372 lines, arcs and shapes, not listed
  text ".Designator" at -4.511,-0.453 h2
3D body "LQFP48_ELVEES_X_T.x_t": height 1.68, standoff 0.03, extent -4.501,-4.5 4.499,4.5

## LQFP48_NIIET_VK035 [mm] "LQFP, 48-Leads, Body 7,00x7,00mm, Pitch 0,50mm"
height 1.4
pads (48):
  rect 1.45x0.3 smd paste+0 mask+0.05: 1(-4.225,2.75)
  oval 1.45x0.3 smd paste+0 mask+0.05: 2(-4.225,2.25) 3(-4.225,1.75) 4(-4.225,1.25) 5(-4.225,0.75) 6(-4.225,0.25) 7(-4.225,-0.25) 8(-4.225,-0.75) 9(-4.225,-1.25) 10(-4.225,-1.75) 11(-4.225,-2.25) 12(-4.225,-2.75) 25(4.225,-2.75) 26(4.225,-2.25) 27(4.225,-1.75) 28(4.225,-1.25) 29(4.225,-0.75) 30(4.225,-0.25) 31(4.225,0.25) 32(4.225,0.75) 33(4.225,1.25) 34(4.225,1.75) 35(4.225,2.25) 36(4.225,2.75)
  oval 0.3x1.45 smd paste+0 mask+0.05: 13(-2.75,-4.225) 14(-2.25,-4.225) 15(-1.75,-4.225) 16(-1.25,-4.225) 17(-0.75,-4.225) 18(-0.25,-4.225) 19(0.25,-4.225) 20(0.75,-4.225) 21(1.25,-4.225) 22(1.75,-4.225) 23(2.25,-4.225) 24(2.75,-4.225) 37(2.75,4.225) 38(2.25,4.225) 39(1.75,4.225) 40(1.25,4.225) 41(0.75,4.225) 42(0.25,4.225) 43(-0.25,4.225) 44(-0.75,4.225) 45(-1.25,4.225) 46(-1.75,4.225) 47(-2.25,4.225) 48(-2.75,4.225)
Top Overlay:
  circle w0.25: c-4.25,3.5 r0.125
  rectangle: -3.85,3.15 -3.15,3.85
  lines w0.2: -3.75,-3.225 -3.75,-3.75 -3.225,-3.75 ; 3.225,-3.75 3.75,-3.75 3.75,-3.225 ; 3.225,3.75 3.75,3.75 3.75,3.225
Top Courtyard:
  lines w0.025: -5.2,-3.2 -3.75,-3.2 -3.75,-3.75 -3.2,-3.75 -3.2,-5.2 3.2,-5.2 3.2,-3.75 3.75,-3.75 3.75,-3.2 5.2,-3.2 5.2,3.2 3.75,3.2 3.75,3.75 3.2,3.75 3.2,5.2 -3.2,5.2 -3.2,3.75 -3.75,3.75 -3.75,3.2 -5.2,3.2 -5.2,-3.2
Top Assembly:
  drawing of 369 lines, arcs and shapes, not listed
  text ".Designator" at -4.511,-0.453 h2
3D body "LQFP48_NIIET_VK035.x_t": height 1.45, standoff 0, extent -4.5,-4.499 4.5,4.501

## LQFP48_WCH [mm] "LQFP, 48-Leads, Body 7,00x7,00mm, Pitch 0,50mm"
height 1.5
pads (48):
  rect 0.3x1.45 smd paste+0 mask+0.05: 1(-2.75,-4.225)
  oval 0.3x1.45 smd paste+0 mask+0.05: 2(-2.25,-4.225) 3(-1.75,-4.225) 4(-1.25,-4.225) 5(-0.75,-4.225) 6(-0.25,-4.225) 7(0.25,-4.225) 8(0.75,-4.225) 9(1.25,-4.225) 10(1.75,-4.225) 11(2.25,-4.225) 12(2.75,-4.225) 25(2.75,4.225) 26(2.25,4.225) 27(1.75,4.225) 28(1.25,4.225) 29(0.75,4.225) 30(0.25,4.225) 31(-0.25,4.225) 32(-0.75,4.225) 33(-1.25,4.225) 34(-1.75,4.225) 35(-2.25,4.225) 36(-2.75,4.225)
  oval 1.45x0.3 smd paste+0 mask+0.05: 13(4.225,-2.75) 14(4.225,-2.25) 15(4.225,-1.75) 16(4.225,-1.25) 17(4.225,-0.75) 18(4.225,-0.25) 19(4.225,0.25) 20(4.225,0.75) 21(4.225,1.25) 22(4.225,1.75) 23(4.225,2.25) 24(4.225,2.75) 37(-4.225,2.75) 38(-4.225,2.25) 39(-4.225,1.75) 40(-4.225,1.25) 41(-4.225,0.75) 42(-4.225,0.25) 43(-4.225,-0.25) 44(-4.225,-0.75) 45(-4.225,-1.25) 46(-4.225,-1.75) 47(-4.225,-2.25) 48(-4.225,-2.75)
Top Overlay:
  circle w0.25: c-3.5,-4.25 r0.125
  region: -3.15,-3.85 -3.15,-3.15 -3.85,-3.15 -3.85,-3.85
  lines w0.2: -3.75,3.225 -3.75,3.75 -3.225,3.75 ; 3.225,-3.75 3.75,-3.75 3.75,-3.225 ; 3.225,3.75 3.75,3.75 3.75,3.225
Top Courtyard:
  lines w0.025: -5.2,-3.2 -3.75,-3.2 -3.75,-3.75 -3.2,-3.75 -3.2,-5.2 3.2,-5.2 3.2,-3.75 3.75,-3.75 3.75,-3.2 5.2,-3.2 5.2,3.2 3.75,3.2 3.75,3.75 3.2,3.75 3.2,5.2 -3.2,5.2 -3.2,3.75 -3.75,3.75 -3.75,3.2 -5.2,3.2 -5.2,-3.2
Top Assembly:
  drawing of 713 lines, arcs and shapes, not listed
  text ".Designator" at -4.511,-0.453 h2
3D body "LQFP48_WCH.x_t": height 1.48, standoff -0.02, extent -4.501,-4.5 4.499,4.5

## LQFP48_WIZNET [mm] "LQFP, 48-Leads, Body 7,00x7,00mm, Pitch 0,50mm"
height 1.4
pads (48):
  rect 1.45x0.3 smd paste+0 mask+0.05: 1(-4.225,2.75)
  oval 1.45x0.3 smd paste+0 mask+0.05: 2(-4.225,2.25) 3(-4.225,1.75) 4(-4.225,1.25) 5(-4.225,0.75) 6(-4.225,0.25) 7(-4.225,-0.25) 8(-4.225,-0.75) 9(-4.225,-1.25) 10(-4.225,-1.75) 11(-4.225,-2.25) 12(-4.225,-2.75) 25(4.225,-2.75) 26(4.225,-2.25) 27(4.225,-1.75) 28(4.225,-1.25) 29(4.225,-0.75) 30(4.225,-0.25) 31(4.225,0.25) 32(4.225,0.75) 33(4.225,1.25) 34(4.225,1.75) 35(4.225,2.25) 36(4.225,2.75)
  oval 0.3x1.45 smd paste+0 mask+0.05: 13(-2.75,-4.225) 14(-2.25,-4.225) 15(-1.75,-4.225) 16(-1.25,-4.225) 17(-0.75,-4.225) 18(-0.25,-4.225) 19(0.25,-4.225) 20(0.75,-4.225) 21(1.25,-4.225) 22(1.75,-4.225) 23(2.25,-4.225) 24(2.75,-4.225) 37(2.75,4.225) 38(2.25,4.225) 39(1.75,4.225) 40(1.25,4.225) 41(0.75,4.225) 42(0.25,4.225) 43(-0.25,4.225) 44(-0.75,4.225) 45(-1.25,4.225) 46(-1.75,4.225) 47(-2.25,4.225) 48(-2.75,4.225)
Top Overlay:
  circle w0.25: c-4.25,3.5 r0.125
  rectangle: -3.85,3.15 -3.15,3.85
  lines w0.2: -3.75,-3.225 -3.75,-3.75 -3.225,-3.75 ; 3.225,-3.75 3.75,-3.75 3.75,-3.225 ; 3.225,3.75 3.75,3.75 3.75,3.225
Top Courtyard:
  lines w0.025: -5.2,-3.2 -5.2,3.2 -3.75,3.2 -3.75,3.75 -3.2,3.75 -3.2,5.2 3.2,5.2 3.2,3.75 3.75,3.75 3.75,3.2 5.2,3.2 5.2,-3.2 3.75,-3.2 3.75,-3.75 3.2,-3.75 3.2,-5.2 -3.2,-5.2 -3.2,-3.75 -3.75,-3.75 -3.75,-3.2 -5.2,-3.2
Top Assembly:
  drawing of 369 lines, arcs and shapes, not listed
  text ".Designator" at -4.511,-0.453 h2
3D body "LQFP48_WIZNET.x_t": height 1.45, standoff 0, extent -4.5,-4.499 4.5,4.501

## LQFP64M_WCH [mm] "WCH LQFP64M package with 0.5mm pitch"
height 1.5
pads (64):
  rect 0.3x1.45 smd paste+0 mask+0.05: 1(-3.75,-5.725)
  oval 0.3x1.45 smd paste+0 mask+0.05: 2(-3.25,-5.725) 3(-2.75,-5.725) 4(-2.25,-5.725) 5(-1.75,-5.725) 6(-1.25,-5.725) 7(-0.75,-5.725) 8(-0.25,-5.725) 9(0.25,-5.725) 10(0.75,-5.725) 11(1.25,-5.725) 12(1.75,-5.725) 13(2.25,-5.725) 14(2.75,-5.725) 15(3.25,-5.725) 16(3.75,-5.725) 33(3.75,5.725) 34(3.25,5.725) 35(2.75,5.725) 36(2.25,5.725) 37(1.75,5.725) 38(1.25,5.725) 39(0.75,5.725) 40(0.25,5.725) 41(-0.25,5.725) 42(-0.75,5.725) 43(-1.25,5.725) 44(-1.75,5.725) 45(-2.25,5.725) 46(-2.75,5.725) 47(-3.25,5.725) 48(-3.75,5.725)
  oval 1.45x0.3 smd paste+0 mask+0.05: 17(5.725,-3.75) 18(5.725,-3.25) 19(5.725,-2.75) 20(5.725,-2.25) 21(5.725,-1.75) 22(5.725,-1.25) 23(5.725,-0.75) 24(5.725,-0.25) 25(5.725,0.25) 26(5.725,0.75) 27(5.725,1.25) 28(5.725,1.75) 29(5.725,2.25) 30(5.725,2.75) 31(5.725,3.25) 32(5.725,3.75) 49(-5.725,3.75) 50(-5.725,3.25) 51(-5.725,2.75) 52(-5.725,2.25) 53(-5.725,1.75) 54(-5.725,1.25) 55(-5.725,0.75) 56(-5.725,0.25) 57(-5.725,-0.25) 58(-5.725,-0.75) 59(-5.725,-1.25) 60(-5.725,-1.75) 61(-5.725,-2.25) 62(-5.725,-2.75) 63(-5.725,-3.25) 64(-5.725,-3.75)
Top Overlay:
  circle w0.25: c-4.5,-6.125 r0.125
  region: -4.2,-5.25 -4.2,-4.2 -5.25,-4.2 -5.25,-5.25
  lines w0.2: -5.25,4.25 -5.25,5.25 -4.25,5.25 ; 4.25,-5.25 5.25,-5.25 5.25,-4.25 ; 4.25,5.25 5.25,5.25 5.25,4.25
Top Courtyard:
  lines w0.025: -6.7,-4.15 -5.25,-4.15 -5.25,-5.25 -4.15,-5.25 -4.15,-6.7 4.15,-6.7 4.15,-5.25 5.25,-5.25 5.25,-4.15 6.7,-4.15 6.7,4.15 5.25,4.15 5.25,5.25 4.15,5.25 4.15,6.7 -4.15,6.7 -4.15,5.25 -5.25,5.25 -5.25,4.15 -6.7,4.15 -6.7,-4.15
Top Assembly:
  drawing of 1113 lines, arcs and shapes, not listed
  text ".Designator" at -4.511,-0.453 h2
3D body "LQFP-64M.x_t": height 1.6, standoff 0, extent -6,-6 6,6

## LQFP100_1921VG015 [mm] "LQFP-100, 100-Leads, Body 14,00x14,00mm, Pitch 0,50mm"
height 1.5
pads (100):
  rect 1.45x0.3 smd paste+0 mask+0.05: 1(-7.725,6)
  oval 1.45x0.3 smd paste+0 mask+0.05: 2(-7.725,5.5) 3(-7.725,5) 4(-7.725,4.5) 5(-7.725,4) 6(-7.725,3.5) 7(-7.725,3) 8(-7.725,2.5) 9(-7.725,2) 10(-7.725,1.5) 11(-7.725,1) 12(-7.725,0.5) 13(-7.725,0) 14(-7.725,-0.5) 15(-7.725,-1) 16(-7.725,-1.5) 17(-7.725,-2) 18(-7.725,-2.5) 19(-7.725,-3) 20(-7.725,-3.5) 21(-7.725,-4) 22(-7.725,-4.5) 23(-7.725,-5) 24(-7.725,-5.5) 25(-7.725,-6) 51(7.725,-6) 52(7.725,-5.5) 53(7.725,-5) 54(7.725,-4.5) 55(7.725,-4) 56(7.725,-3.5) 57(7.725,-3) 58(7.725,-2.5) 59(7.725,-2) 60(7.725,-1.5) 61(7.725,-1) 62(7.725,-0.5) 63(7.725,0) 64(7.725,0.5) 65(7.725,1) 66(7.725,1.5) 67(7.725,2) 68(7.725,2.5) 69(7.725,3) 70(7.725,3.5) 71(7.725,4) 72(7.725,4.5) 73(7.725,5) 74(7.725,5.5) 75(7.725,6)
  oval 0.3x1.45 smd paste+0 mask+0.05: 26(-6,-7.725) 27(-5.5,-7.725) 28(-5,-7.725) 29(-4.5,-7.725) 30(-4,-7.725) 31(-3.5,-7.725) 32(-3,-7.725) 33(-2.5,-7.725) 34(-2,-7.725) 35(-1.5,-7.725) 36(-1,-7.725) 37(-0.5,-7.725) 38(0,-7.725) 39(0.5,-7.725) 40(1,-7.725) 41(1.5,-7.725) 42(2,-7.725) 43(2.5,-7.725) 44(3,-7.725) 45(3.5,-7.725) 46(4,-7.725) 47(4.5,-7.725) 48(5,-7.725) 49(5.5,-7.725) 50(6,-7.725) 76(6,7.725) 77(5.5,7.725) 78(5,7.725) 79(4.5,7.725) 80(4,7.725) 81(3.5,7.725) 82(3,7.725) 83(2.5,7.725) 84(2,7.725) 85(1.5,7.725) 86(1,7.725) 87(0.5,7.725) 88(0,7.725) 89(-0.5,7.725) 90(-1,7.725) 91(-1.5,7.725) 92(-2,7.725) 93(-2.5,7.725) 94(-3,7.725) 95(-3.5,7.725) 96(-4,7.725) 97(-4.5,7.725) 98(-5,7.725) 99(-5.5,7.725) 100(-6,7.725)
Top Overlay:
  circle w0.6: c-5.5,5.5 r0.3
  circle w0.25: c-8.125,6.75 r0.125
  rectangle: -7.25,6.4 -6.4,7.25
  lines w0.2: -7.15,-6.55 -7.15,-7.15 -6.525,-7.15 ; 6.525,7.15 7.15,7.15 7.15,6.55 ; 6.55,-7.15 7.15,-7.15 7.15,-6.525
Top Courtyard:
  lines w0.025: -8.7,-6.4 -8.7,6.4 -7.2,6.4 -7.2,7.2 -6.4,7.2 -6.4,8.7 6.4,8.7 6.4,7.2 7.2,7.2 7.2,6.4 8.7,6.4 8.7,-6.4 7.2,-6.4 7.2,-7.2 6.4,-7.2 6.4,-8.7 -6.4,-8.7 -6.4,-7.2 -7.2,-7.2 -7.2,-6.4 -8.7,-6.4
Top Assembly:
  drawing of 733 lines, arcs and shapes, not listed
  text ".Designator" at -4.511,-0.453 h2
3D body "LQFP100_1921VG015.x_t": height 1.55, standoff 0, extent -8,-8 8,8

## LQFP100_ADV7511 [mm] "Analog Devices case style ST-100, compatible JEDEC MS-026-BED, 100-Leads, Body 14,00x14,00mm, Pitch 0,50mm"
height 1.6
pads (100):
  rect 1.45x0.3 smd paste+0 mask+0.05: 1(-7.725,6)
  oval 1.45x0.3 smd paste+0 mask+0.05: 2(-7.725,5.5) 3(-7.725,5) 4(-7.725,4.5) 5(-7.725,4) 6(-7.725,3.5) 7(-7.725,3) 8(-7.725,2.5) 9(-7.725,2) 10(-7.725,1.5) 11(-7.725,1) 12(-7.725,0.5) 13(-7.725,0) 14(-7.725,-0.5) 15(-7.725,-1) 16(-7.725,-1.5) 17(-7.725,-2) 18(-7.725,-2.5) 19(-7.725,-3) 20(-7.725,-3.5) 21(-7.725,-4) 22(-7.725,-4.5) 23(-7.725,-5) 24(-7.725,-5.5) 25(-7.725,-6) 51(7.725,-6) 52(7.725,-5.5) 53(7.725,-5) 54(7.725,-4.5) 55(7.725,-4) 56(7.725,-3.5) 57(7.725,-3) 58(7.725,-2.5) 59(7.725,-2) 60(7.725,-1.5) 61(7.725,-1) 62(7.725,-0.5) 63(7.725,0) 64(7.725,0.5) 65(7.725,1) 66(7.725,1.5) 67(7.725,2) 68(7.725,2.5) 69(7.725,3) 70(7.725,3.5) 71(7.725,4) 72(7.725,4.5) 73(7.725,5) 74(7.725,5.5) 75(7.725,6)
  oval 0.3x1.45 smd paste+0 mask+0.05: 26(-6,-7.725) 27(-5.5,-7.725) 28(-5,-7.725) 29(-4.5,-7.725) 30(-4,-7.725) 31(-3.5,-7.725) 32(-3,-7.725) 33(-2.5,-7.725) 34(-2,-7.725) 35(-1.5,-7.725) 36(-1,-7.725) 37(-0.5,-7.725) 38(0,-7.725) 39(0.5,-7.725) 40(1,-7.725) 41(1.5,-7.725) 42(2,-7.725) 43(2.5,-7.725) 44(3,-7.725) 45(3.5,-7.725) 46(4,-7.725) 47(4.5,-7.725) 48(5,-7.725) 49(5.5,-7.725) 50(6,-7.725) 76(6,7.725) 77(5.5,7.725) 78(5,7.725) 79(4.5,7.725) 80(4,7.725) 81(3.5,7.725) 82(3,7.725) 83(2.5,7.725) 84(2,7.725) 85(1.5,7.725) 86(1,7.725) 87(0.5,7.725) 88(0,7.725) 89(-0.5,7.725) 90(-1,7.725) 91(-1.5,7.725) 92(-2,7.725) 93(-2.5,7.725) 94(-3,7.725) 95(-3.5,7.725) 96(-4,7.725) 97(-4.5,7.725) 98(-5,7.725) 99(-5.5,7.725) 100(-6,7.725)
Top Overlay:
  circle w0.6: c-5.5,5.5 r0.3
  circle w0.25: c-8.125,6.75 r0.125
  rectangle: -7.25,6.4 -6.4,7.25
  lines w0.2: -7.15,-6.55 -7.15,-7.15 -6.525,-7.15 ; 6.525,7.15 7.15,7.15 7.15,6.55 ; 6.55,-7.15 7.15,-7.15 7.15,-6.525
Top Courtyard:
  lines w0.025: -8.7,-6.4 -8.7,6.4 -7.2,6.4 -7.2,7.2 -6.4,7.2 -6.4,8.7 6.4,8.7 6.4,7.2 7.2,7.2 7.2,6.4 8.7,6.4 8.7,-6.4 7.2,-6.4 7.2,-7.2 6.4,-7.2 6.4,-8.7 -6.4,-8.7 -6.4,-7.2 -7.2,-7.2 -7.2,-6.4 -8.7,-6.4
Top Assembly:
  drawing of 725 lines, arcs and shapes, not listed
  text ".Designator" at -4.511,-0.453 h2
3D body "LQFP100_ADV7511.x_t": height 1.6, standoff 0, extent -8,-8 8,8

## LQFP100_WCH [mm] "WCH LQFP100 package with 0.5mm pitch"
height 1.5
pads (100):
  rect 0.3x1.45 smd paste+0 mask+0.05: 1(-6,-7.725)
  oval 0.3x1.45 smd paste+0 mask+0.05: 2(-5.5,-7.725) 3(-5,-7.725) 4(-4.5,-7.725) 5(-4,-7.725) 6(-3.5,-7.725) 7(-3,-7.725) 8(-2.5,-7.725) 9(-2,-7.725) 10(-1.5,-7.725) 11(-1,-7.725) 12(-0.5,-7.725) 13(0,-7.725) 14(0.5,-7.725) 15(1,-7.725) 16(1.5,-7.725) 17(2,-7.725) 18(2.5,-7.725) 19(3,-7.725) 20(3.5,-7.725) 21(4,-7.725) 22(4.5,-7.725) 23(5,-7.725) 24(5.5,-7.725) 25(6,-7.725) 51(6,7.725) 52(5.5,7.725) 53(5,7.725) 54(4.5,7.725) 55(4,7.725) 56(3.5,7.725) 57(3,7.725) 58(2.5,7.725) 59(2,7.725) 60(1.5,7.725) 61(1,7.725) 62(0.5,7.725) 63(0,7.725) 64(-0.5,7.725) 65(-1,7.725) 66(-1.5,7.725) 67(-2,7.725) 68(-2.5,7.725) 69(-3,7.725) 70(-3.5,7.725) 71(-4,7.725) 72(-4.5,7.725) 73(-5,7.725) 74(-5.5,7.725) 75(-6,7.725)
  oval 1.45x0.3 smd paste+0 mask+0.05: 26(7.725,-6) 27(7.725,-5.5) 28(7.725,-5) 29(7.725,-4.5) 30(7.725,-4) 31(7.725,-3.5) 32(7.725,-3) 33(7.725,-2.5) 34(7.725,-2) 35(7.725,-1.5) 36(7.725,-1) 37(7.725,-0.5) 38(7.725,0) 39(7.725,0.5) 40(7.725,1) 41(7.725,1.5) 42(7.725,2) 43(7.725,2.5) 44(7.725,3) 45(7.725,3.5) 46(7.725,4) 47(7.725,4.5) 48(7.725,5) 49(7.725,5.5) 50(7.725,6) 76(-7.725,6) 77(-7.725,5.5) 78(-7.725,5) 79(-7.725,4.5) 80(-7.725,4) 81(-7.725,3.5) 82(-7.725,3) 83(-7.725,2.5) 84(-7.725,2) 85(-7.725,1.5) 86(-7.725,1) 87(-7.725,0.5) 88(-7.725,0) 89(-7.725,-0.5) 90(-7.725,-1) 91(-7.725,-1.5) 92(-7.725,-2) 93(-7.725,-2.5) 94(-7.725,-3) 95(-7.725,-3.5) 96(-7.725,-4) 97(-7.725,-4.5) 98(-7.725,-5) 99(-7.725,-5.5) 100(-7.725,-6)
Top Overlay:
  circle w0.6: c-5.5,-5.5 r0.3
  circle w0.25: c-6.75,-8.125 r0.125
  region: -6.4,-7.25 -6.4,-6.4 -7.25,-6.4 -7.25,-7.25
  lines w0.2: -7.15,6.525 -7.15,7.15 -6.55,7.15 ; 6.525,7.15 7.15,7.15 7.15,6.55 ; 6.55,-7.15 7.15,-7.15 7.15,-6.525
Top Courtyard:
  lines w0.025: -8.7,-6.4 -8.7,6.4 -7.2,6.4 -7.2,7.2 -6.4,7.2 -6.4,8.7 6.4,8.7 6.4,7.2 7.2,7.2 7.2,6.4 8.7,6.4 8.7,-6.4 7.2,-6.4 7.2,-7.2 6.4,-7.2 6.4,-8.7 -6.4,-8.7 -6.4,-7.2 -7.2,-7.2 -7.2,-6.4 -8.7,-6.4
Top Assembly:
  drawing of 725 lines, arcs and shapes, not listed
  text ".Designator" at -4.511,-0.453 h2
3D body "LQFP100_WCH.x_t": height 1.6, standoff 0, extent -8,-8 8,8

## LQFP128_TIVA_C [mm] "S-PQFP-G128, 128-Leads, Body 14.00x14.00mm, Pitch 0.40mm"
height 1
pads (128):
  rect 0.2x1.3 smd paste+0 mask+0.05: 1(-6.2,-7.725)
  oval 0.2x1.3 smd paste+0 mask+0.05: 2(-5.8,-7.725) 3(-5.4,-7.725) 4(-5,-7.725) 5(-4.6,-7.725) 6(-4.2,-7.725) 7(-3.8,-7.725) 8(-3.4,-7.725) 9(-3,-7.725) 10(-2.6,-7.725) 11(-2.2,-7.725) 12(-1.8,-7.725) 13(-1.4,-7.725) 14(-1,-7.725) 15(-0.6,-7.725) 16(-0.2,-7.725) 17(0.2,-7.725) 18(0.6,-7.725) 19(1,-7.725) 20(1.4,-7.725) 21(1.8,-7.725) 22(2.2,-7.725) 23(2.6,-7.725) 24(3,-7.725) 25(3.4,-7.725) 26(3.8,-7.725) 27(4.2,-7.725) 28(4.6,-7.725) 29(5,-7.725) 30(5.4,-7.725) 31(5.8,-7.725) 32(6.2,-7.725) 65(6.2,7.725) 66(5.8,7.725) 67(5.4,7.725) 68(5,7.725) 69(4.6,7.725) 70(4.2,7.725) 71(3.8,7.725) 72(3.4,7.725) 73(3,7.725) 74(2.6,7.725) 75(2.2,7.725) 76(1.8,7.725) 77(1.4,7.725) 78(1,7.725) 79(0.6,7.725) 80(0.2,7.725) 81(-0.2,7.725) 82(-0.6,7.725) 83(-1,7.725) 84(-1.4,7.725) 85(-1.8,7.725) 86(-2.2,7.725) 87(-2.6,7.725) 88(-3,7.725) 89(-3.4,7.725) 90(-3.8,7.725) 91(-4.2,7.725) 92(-4.6,7.725) 93(-5,7.725) 94(-5.4,7.725) 95(-5.8,7.725) 96(-6.2,7.725)
  oval 1.3x0.2 smd paste+0 mask+0.05: 33(7.725,-6.2) 34(7.725,-5.8) 35(7.725,-5.4) 36(7.725,-5) 37(7.725,-4.6) 38(7.725,-4.2) 39(7.725,-3.8) 40(7.725,-3.4) 41(7.725,-3) 42(7.725,-2.6) 43(7.725,-2.2) 44(7.725,-1.8) 45(7.725,-1.4) 46(7.725,-1) 47(7.725,-0.6) 48(7.725,-0.2) 49(7.725,0.2) 50(7.725,0.6) 51(7.725,1) 52(7.725,1.4) 53(7.725,1.8) 54(7.725,2.2) 55(7.725,2.6) 56(7.725,3) 57(7.725,3.4) 58(7.725,3.8) 59(7.725,4.2) 60(7.725,4.6) 61(7.725,5) 62(7.725,5.4) 63(7.725,5.8) 64(7.725,6.2) 97(-7.725,6.2) 98(-7.725,5.8) 99(-7.725,5.4) 100(-7.725,5) 101(-7.725,4.6) 102(-7.725,4.2) 103(-7.725,3.8) 104(-7.725,3.4) 105(-7.725,3) 106(-7.725,2.6) 107(-7.725,2.2) 108(-7.725,1.8) 109(-7.725,1.4) 110(-7.725,1) 111(-7.725,0.6) 112(-7.725,0.2) 113(-7.725,-0.2) 114(-7.725,-0.6) 115(-7.725,-1) 116(-7.725,-1.4) 117(-7.725,-1.8) 118(-7.725,-2.2) 119(-7.725,-2.6) 120(-7.725,-3) 121(-7.725,-3.4) 122(-7.725,-3.8) 123(-7.725,-4.2) 124(-7.725,-4.6) 125(-7.725,-5) 126(-7.725,-5.4) 127(-7.725,-5.8) 128(-7.725,-6.2)
Top Overlay:
  circle w0.6: c-5.6,-5.6 r0.3
  circle w0.25: c-6.9,-7.725 r0.125
  region: -6.5,-7.175 -6.5,-6.5 -7.175,-6.5 -7.175,-7.175
  lines w0.2: -7.125,6.65 -7.125,7.125 -6.65,7.125 ; -7.075,-6.6 -7.075,-7.075 -6.6,-7.075 ; 6.65,-7.125 7.125,-7.125 7.125,-6.65 ; 6.65,7.125 7.125,7.125 7.125,6.65
Top Courtyard:
  lines w0.025: -8.65,-6.55 -8.65,6.55 -7.2,6.55 -7.2,7.2 -6.55,7.2 -6.55,8.65 6.55,8.65 6.55,7.2 7.2,7.2 7.2,6.55 8.65,6.55 8.65,-6.55 7.2,-6.55 7.2,-7.2 6.55,-7.2 6.55,-8.65 -6.55,-8.65 -6.55,-7.2 -7.2,-7.2 -7.2,-6.55 -8.65,-6.55
Top Assembly:
  drawing of 1542 lines, arcs and shapes, not listed
  text ".Designator" at -4.511,-0.453 h2
3D body "S-PQFP-G128.x_t": height 1.05, standoff 0, extent -8,-8 8,8